# Altium footprint library AVP32F335_EVM_Rev1.0.PcbLib: 50 footprints (part 4 of 4)
Each footprint in its own frame and in the unit in brackets; x right, y up, seen from the top. Pads: shape width x height; smd on the part's side, far side on the other; paste and mask are expansions set on the pad; w line width, h text height; cw(c..) or ccw(c..) is an arc to the next point about the centre after c.
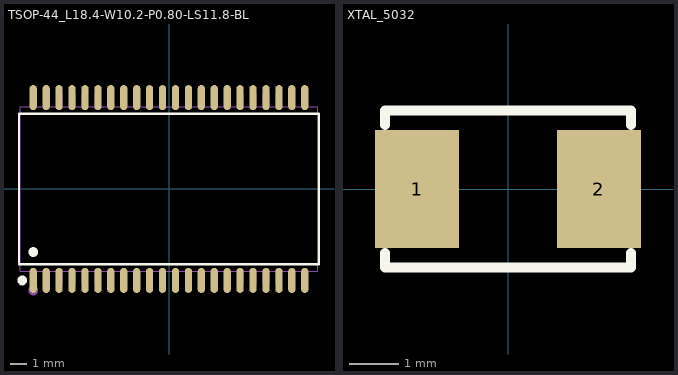
[diagram p3: the footprints below, top view; thin cyan lines are the x and y axes]

## TSOP-44_L18.4-W10.2-P0.80-LS11.8-BL [mm]
height 0.9
pads (44):
  oval 0.448x1.551 smd: 1(-8.4,-5.656) 2(-7.6,-5.656) 3(-6.8,-5.656) 4(-6,-5.656) 5(-5.2,-5.656) 6(-4.4,-5.656) 7(-3.6,-5.656) 8(-2.8,-5.656) 9(-2,-5.656) 10(-1.2,-5.656) 11(-0.4,-5.656) 12(0.4,-5.656) 13(1.2,-5.656) 14(2,-5.656) 15(2.8,-5.656) 16(3.6,-5.656) 17(4.4,-5.656) 18(5.2,-5.656) 19(6,-5.656) 20(6.8,-5.656) 21(7.6,-5.656) 22(8.4,-5.656) 23(8.4,5.656) 24(7.6,5.656) 25(6.8,5.656) 26(6,5.656) 27(5.2,5.656) 28(4.4,5.656) 29(3.6,5.656) 30(2.8,5.656) 31(2,5.656) 32(1.2,5.656) 33(0.4,5.656) 34(-0.4,5.656) 35(-1.2,5.656) 36(-2,5.656) 37(-2.8,5.656) 38(-3.6,5.656) 39(-4.4,5.656) 40(-5.2,5.656) 41(-6,5.656) 42(-6.8,5.656) 43(-7.6,5.656) 44(-8.4,5.656)
Top Overlay:
  circle w0.3: c-8.4,-3.899 r0.15
  circle w0.3: c-9.076,-5.656 r0.15
  lines w0.152: -9.281,-4.651 -9.281,4.651 9.281,4.651 9.281,-4.651 -9.281,-4.651
Mechanical 6:
  circle w0.3: c-8.4,-6.28 r0.15
Mechanical 15:
  drawing of 93 lines, arcs and shapes, not listed

## XTAL_5032 [mm] "5032晶振"
height 1.2
pads (2):
  rect 1.7x2.4 smd: 1(-1.85,0) 2(1.85,0)
Top Overlay:
  lines w0.203: -2.5,-1.3 -2.5,-1.6 2.5,-1.6 2.5,-1.3 ; -2.5,1.3 -2.5,1.6 2.5,1.6 2.5,1.3
3D body "User Library-ABM3-1.STEP": height 1.3, standoff 0, extent -2.525,-1.549 2.475,1.651